# Altium footprint library PCB_LIB_Autolog.PcbLib: 30 footprints (part 1 of 2)
Each footprint in its own frame and in the unit in brackets; x right, y up, seen from the top. Pads: shape width x height; smd on the part's side, far side on the other; paste and mask are expansions set on the pad; w line width, h text height; cw(c..) or ccw(c..) is an arc to the next point about the centre after c.
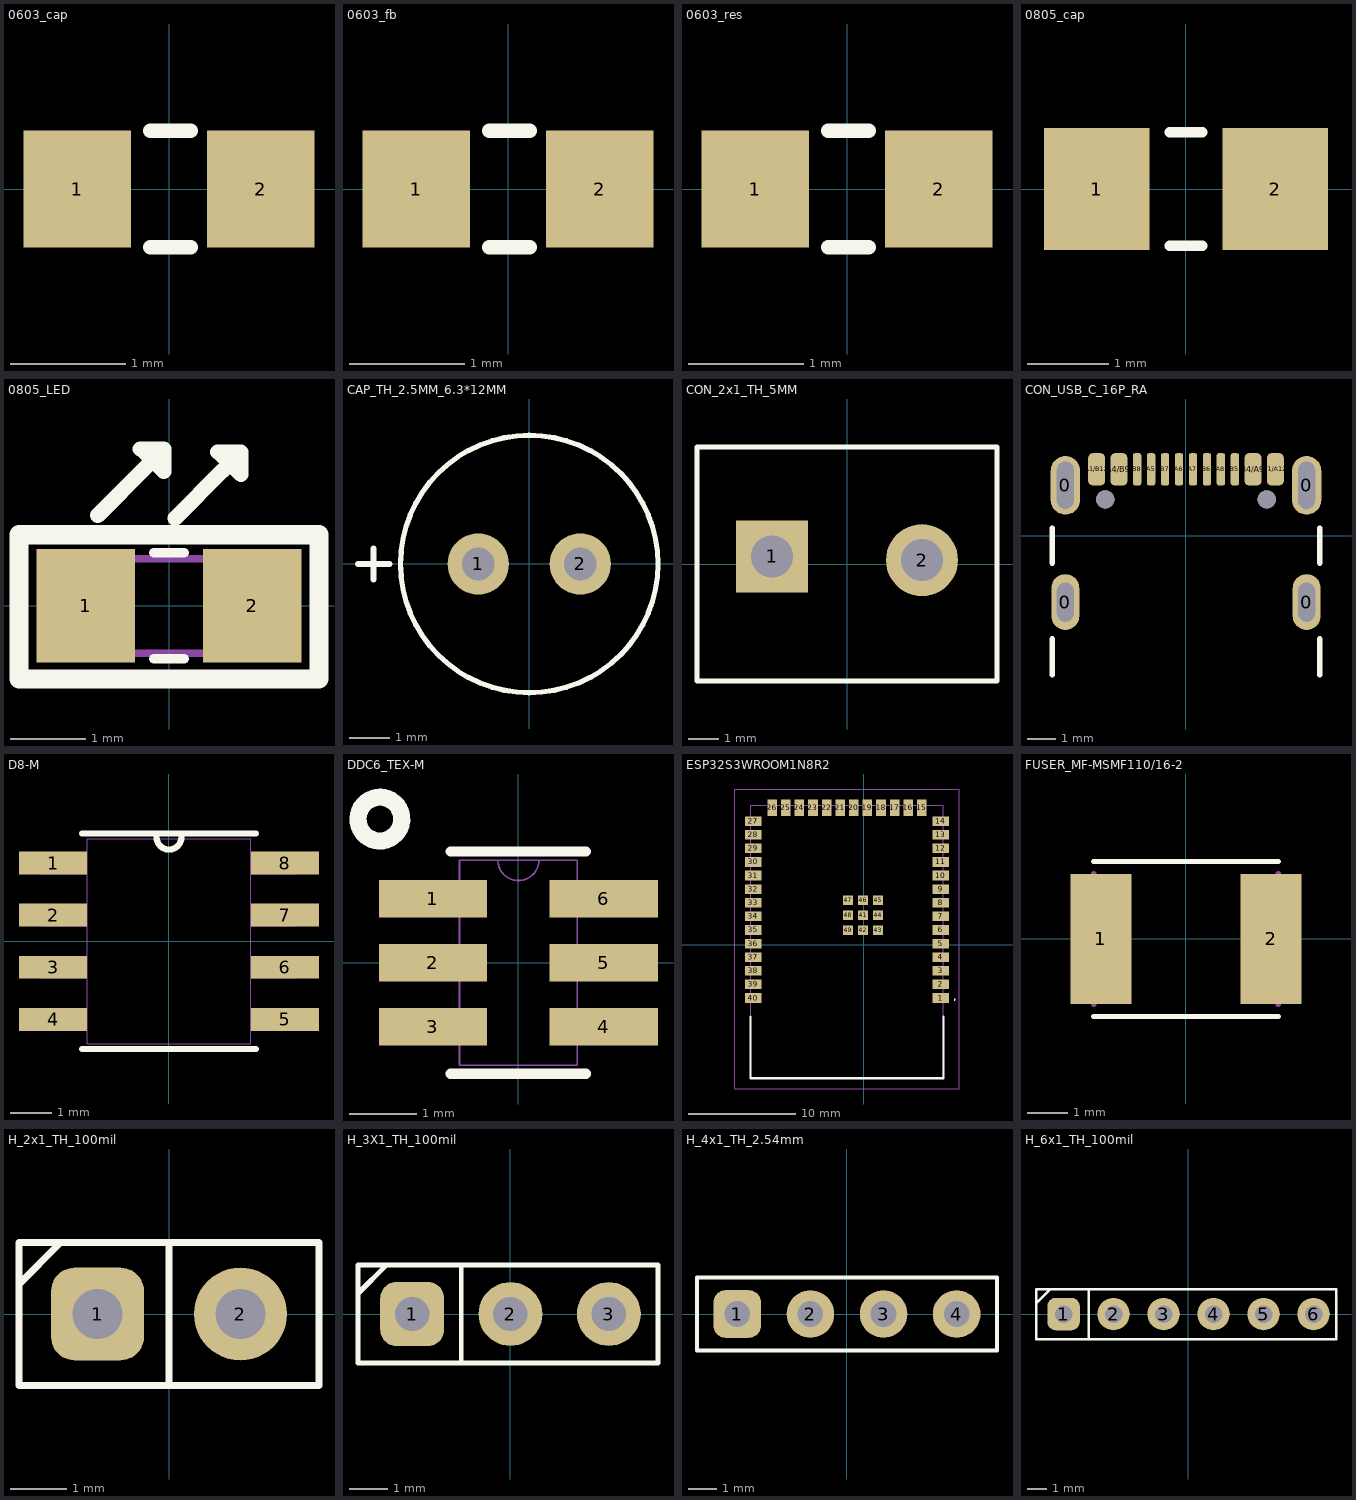
[diagram p0: the footprints below, top view; thin cyan lines are the x and y axes]

## 0603_cap [mil]
pads (2):
  rect 37x40 smd: 1(-31.5,0) 2(31.5,0)
Top Overlay:
  lines w5: -6.5,-20 7.5,-20 ; -6.5,20 7.5,20
3D body "CircuitWorks-CAPACITOR 0603.STEP": height 34.36, standoff 0.5, extent -31.5,-16.93 31.5,16.93

## 0603_fb [mil]
pads (2):
  rect 37x40 smd: 1(-31.5,0) 2(31.5,0)
Top Overlay:
  lines w5: -6.5,-20 7.5,-20 ; -6.5,20 7.5,20
3D body "742792602.stp": height 32, standoff 0.5, extent -31.5,-15.75 31.49,15.75

## 0603_res [mil] "1608 Metric / 20190225 / C-A.Serna.A"
pads (2):
  rect 37x40 smd: 1(-31.5,0) 2(31.5,0)
Top Overlay:
  lines w5: -6.5,-20 7.5,-20 ; -6.5,20 7.5,20
3D body "C0603.step": height 11.89, standoff 0, extent -31.5,-15.75 31.5,15.75

## 0805_cap [mm]
pads (2):
  rect 1.3x1.5 smd: 1(-1.1,0) 2(1.1,0)
Top Overlay:
  lines w0.127: -0.2,-0.7 0.2,-0.7 ; -0.2,0.7 0.2,0.7
3D body: height 1, standoff 0, extent -1.125,-0.7 1.075,0.7

## 0805_LED [mm]
pads (2):
  rect 1.3x1.5 smd: 1(-1.1,0) 2(1.1,0)
Top Overlay:
  lines w0.127: -0.2,-0.7 0.2,-0.7 ; -0.2,0.7 0.2,0.7
  lines w0.203: -0.941,1.197 -0.306,1.832 ; -0.38,2.072 -0.069,2.072 -0.069,1.775 -0.366,2.072 ; 0.079,1.157 0.714,1.792 ; 0.64,2.032 0.951,2.032 0.951,1.735 0.654,2.032
  lines w0.254: -1.981,-0.965 1.981,-0.965 1.981,0.94 -1.981,0.94 -1.981,-0.965
Mechanical 1:
  lines w0.1: -0.7,-0.625 -0.7,0.625 ; 0.7,-0.625 0.7,0.625 ; -1,-0.625 1,-0.625 1,0.625 -1,0.625 -1,-0.625
3D body: height 1.1, standoff 0.5, extent -0.7,-0.625 0.7,0.625
3D body: height 0.5, standoff 0, extent -1,-0.625 1,0.625

## CAP_TH_2.5MM_6.3*12MM [mm]
pads (2):
  round 1.5 hole 0.8: 1(-1.25,0) 2(1.25,0)
Top Overlay:
  circle w0.127: c0,0 r3.15
  lines w0.152: -4.191,0 -3.429,0 ; -3.81,-0.381 -3.81,0.381
3D body: height 12, standoff 0, extent -3.15,-3.15 3.15,3.15

## CON_2x1_TH_5MM [mm]
pads (2):
  rect 2.4x2.4 hole 1.4: 1(-2.5,0.254)
  round 2.4 hole 1.4: 2(2.5,0.127)
Top Overlay:
  lines w0.152: -5,-3.9 -5,3.9 5,3.9 5,-3.9 -5,-3.9
3D body: height 10.2, standoff 0, extent -5,-3.9 5,3.9

## CON_USB_C_16P_RA [mm]
pads (18):
  oval 1x2 hole 0.6 slot 1.4 at 90 deg: 0(-4.32,-2.377) 0(4.32,-2.377)
  oval 1.05x2.1 hole 0.6 slot 1.7 at 90 deg: 0(-4.32,1.803) 0(4.32,1.803)
  rrect50% 0.6x1.15 smd: A1/B12(-3.2,2.378) A4/B9(-2.4,2.378) B1/A12(3.2,2.378) B4/A9(2.4,2.378)
  rrect50% 0.3x1.15 smd: A5(-1.25,2.378) A6(-0.25,2.378) A7(0.25,2.378) A8(1.25,2.378) B5(1.75,2.378) B6(0.75,2.378) B7(-0.75,2.378) B8(-1.75,2.378)
  round 0.65 hole 0.65 unplated: ""(-2.89,1.303) ""(2.89,1.303)
Top Overlay:
  lines w0.2: -4.79,-4.977 -4.79,-3.697 ; -4.79,-0.977 -4.79,0.273 ; 4.79,-4.977 4.79,-3.697 ; 4.79,-0.977 4.79,0.273
3D body "step_temp.STEP": height 3.31, standoff -0.85, extent -4.79,-4.977 4.79,2.733

## D8-M [mil]
pads (8):
  rect 65.5x22 smd paste+0: 1(-111.25,75) 2(-111.25,25) 3(-111.25,-25) 4(-111.25,-75) 5(111.25,-75) 6(111.25,-25) 7(111.25,25) 8(111.25,75)
Top Overlay:
  lines w6: -83.5,-103.5 83.5,-103.5 ; -83.5,103.5 83.5,103.5 ; -12,100 ccw(c0,100) 12,100
Mechanical 13:
  lines w1: -12,98.5 ccw(c0,98.5) 12,98.5 ; -122,-85 -78.5,-85 -78.5,-65 -122,-65 -122,-85 ; -122,-35 -78.5,-35 -78.5,-15 -122,-15 -122,-35 ; -122,15 -78.5,15 -78.5,35 -122,35 -122,15 ; -122,65 -78.5,65 -78.5,85 -122,85 -122,65 ; -78.5,-98.5 -78.5,98.5 78.5,98.5 78.5,-98.5 -78.5,-98.5 ; 78.5,-85 122,-85 122,-65 78.5,-65 78.5,-85 ; 78.5,-35 122,-35 122,-15 78.5,-15 78.5,-35 ; 78.5,15 122,15 122,35 78.5,35 78.5,15 ; 78.5,65 122,65 122,85 78.5,85 78.5,65
3D body "D8.step": height 69.09, standoff 0, extent -122.01,-98.5 122.01,98.5

## DDC6_TEX-M [mm]
pads (6):
  rect 1.61x0.558 smd paste+0: 1(-1.269,0.95) 2(-1.269,0) 3(-1.269,-0.95) 4(1.269,-0.95) 5(1.269,0) 6(1.269,0.95)
Top Overlay:
  lines w0.152: -1.003,-1.651 1.003,-1.651 ; -1.003,1.651 1.003,1.651
  lines w0.254: -1.751,2.243 ccw(c-2.057,2.134) -1.745,2.223
Mechanical 13:
  lines w0.025: -0.305,1.524 ccw(c0,1.524) 0.305,1.524 ; -1.524,-1.204 -0.876,-1.204 -0.876,-0.696 -1.524,-0.696 -1.524,-1.204 ; -1.524,-0.254 -0.876,-0.254 -0.876,0.254 -1.524,0.254 -1.524,-0.254 ; -1.524,0.696 -0.876,0.696 -0.876,1.204 -1.524,1.204 -1.524,0.696 ; -0.876,-1.524 -0.876,1.524 0.876,1.524 0.876,-1.524 -0.876,-1.524 ; 0.876,-1.204 1.524,-1.204 1.524,-0.696 0.876,-0.696 0.876,-1.204 ; 0.876,-0.254 1.524,-0.254 1.524,0.254 0.876,0.254 0.876,-0.254 ; 0.876,0.696 1.524,0.696 1.524,1.204 0.876,1.204 0.876,0.696
3D body "DDC6_TEX.step": height 1.7, standoff 0, extent -1.524,-1.524 1.524,1.524

## ESP32S3WROOM1N8R2 [mm]
pads (49):
  rect 1.5x0.9 smd: 1(7.201,-4.955) 2(7.201,-3.685) 3(7.201,-2.415) 4(7.201,-1.145) 5(7.201,0.125) 6(7.201,1.395) 7(7.201,2.665) 8(7.201,3.935) 9(7.201,5.205) 10(7.201,6.475) 11(7.201,7.745) 12(7.201,9.015) 13(7.201,10.285) 14(7.201,11.555) 27(-10.299,11.555) 28(-10.299,10.285) 29(-10.299,9.015) 30(-10.299,7.745) 31(-10.299,6.475) 32(-10.299,5.205) 33(-10.299,3.935) 34(-10.299,2.665) 35(-10.299,1.395) 36(-10.299,0.125) 37(-10.299,-1.145) 38(-10.299,-2.415) 39(-10.299,-3.685) 40(-10.299,-4.955)
  rect 0.9x1.5 smd: 15(5.436,12.805) 16(4.166,12.805) 17(2.896,12.805) 18(1.626,12.805) 19(0.356,12.805) 20(-0.914,12.805) 21(-2.184,12.805) 22(-3.454,12.805) 23(-4.724,12.805) 24(-5.994,12.805) 25(-7.264,12.805) 26(-8.534,12.805)
  rect 0.9x0.9 smd: 41(-0.049,2.765) 42(-0.049,1.365) 43(1.351,1.365) 44(1.351,2.765) 45(1.351,4.165) 46(-0.049,4.165) 47(-1.449,4.165) 48(-1.449,2.765) 49(-1.449,1.365)
Top Overlay:
  lines w0.1: 8.451,-5.095 ccw(c8.501,-5.095) 8.551,-5.095 ccw(c8.501,-5.095) 8.451,-5.095
  lines w0.2: -10.549,-6.695 -10.549,-12.445 7.451,-12.445 7.451,-6.695
Mechanical 13:
  lines w0.1: -12.049,-13.445 8.951,-13.445 8.951,14.555 -12.049,14.555 -12.049,-13.445 ; -10.549,-12.445 7.451,-12.445 7.451,13.055 -10.549,13.055 -10.549,-12.445
3D body "step_temp.STEP": height 3.25, standoff 0, extent -10.549,-12.445 7.451,13.055

## FUSER_MF-MSMF110/16-2 [mm]
pads (2):
  rect 1.5x3.2 smd: 1(-2.1,0) 2(2.1,0)
Top Overlay:
  lines w0.127: -2.275,-1.913 2.275,-1.913 ; -2.275,1.913 2.275,1.913
Mechanical 13:
  lines w0.127: -2.275,-1.62 -2.275,1.62 ; 2.275,-1.62 2.275,1.62
3D body "step_temp.STEP": height 0.85, standoff 0, extent -2.275,-1.62 2.275,1.62

## H_2x1_TH_100mil [mil]
pads (2):
  rrect50% 65x65 hole 35: 1(-50,0)
  round 65 hole 35: 2(50,0)
Top Overlay:
  lines w5: -105,20.87 -75.87,50 ; 0,-50 0,50 ; -105,-50 105,-50 105,50 -105,50 -105,-50
3D body "PH1-02-UA.STEP": height 338.58, standoff -116.14, extent -100.8,-49.16 99.48,49.26

## H_3X1_TH_100mil [mil]
pads (3):
  rrect50% 65x65 hole 35: 1(-100,0)
  round 65 hole 35: 2(0,0) 3(100,0)
Top Overlay:
  lines w5: -155,20.87 -125.87,50 ; -50,-50 -50,50 ; -155,-50 150,-50 150,50 -155,50 -155,-50
3D body "5-146278-3--3DModel-STEP-1.STEP": height 320.5, standoff -119.5, extent -142,-46 142,46

## H_4x1_TH_2.54mm [mil]
pads (4):
  rrect50% 65x65 hole 35: 1(-150,0)
  round 65 hole 35: 2(-50,0) 3(50,0) 4(150,0)
Top Overlay:
  lines w5: -205,-50 205.12,-50 205.12,50 -205,50 -205,-50
3D body "TSW-104-14-T-S.step": height 420, standoff -110, extent -200.01,-50 204.99,50

## H_6x1_TH_100mil [mil]
pads (6):
  rrect50% 65x65 hole 35: 1(-250,0)
  round 65 hole 35: 2(-150,0) 3(-50,0) 4(50,0) 5(150,0) 6(250,0)
Top Overlay:
  lines w5: -305,20.87 -275.87,50 ; -200,-50 -200,50 ; -305,-50 295,-50 295,50 -305,50 -305,-50